# Altium footprint library PCB_V2.PcbLib: 82 footprints (part 5 of 6)
Each footprint in its own frame and in the unit in brackets; x right, y up, seen from the top. Pads: shape width x height; smd on the part's side, far side on the other; paste and mask are expansions set on the pad; w line width, h text height; cw(c..) or ccw(c..) is an arc to the next point about the centre after c.
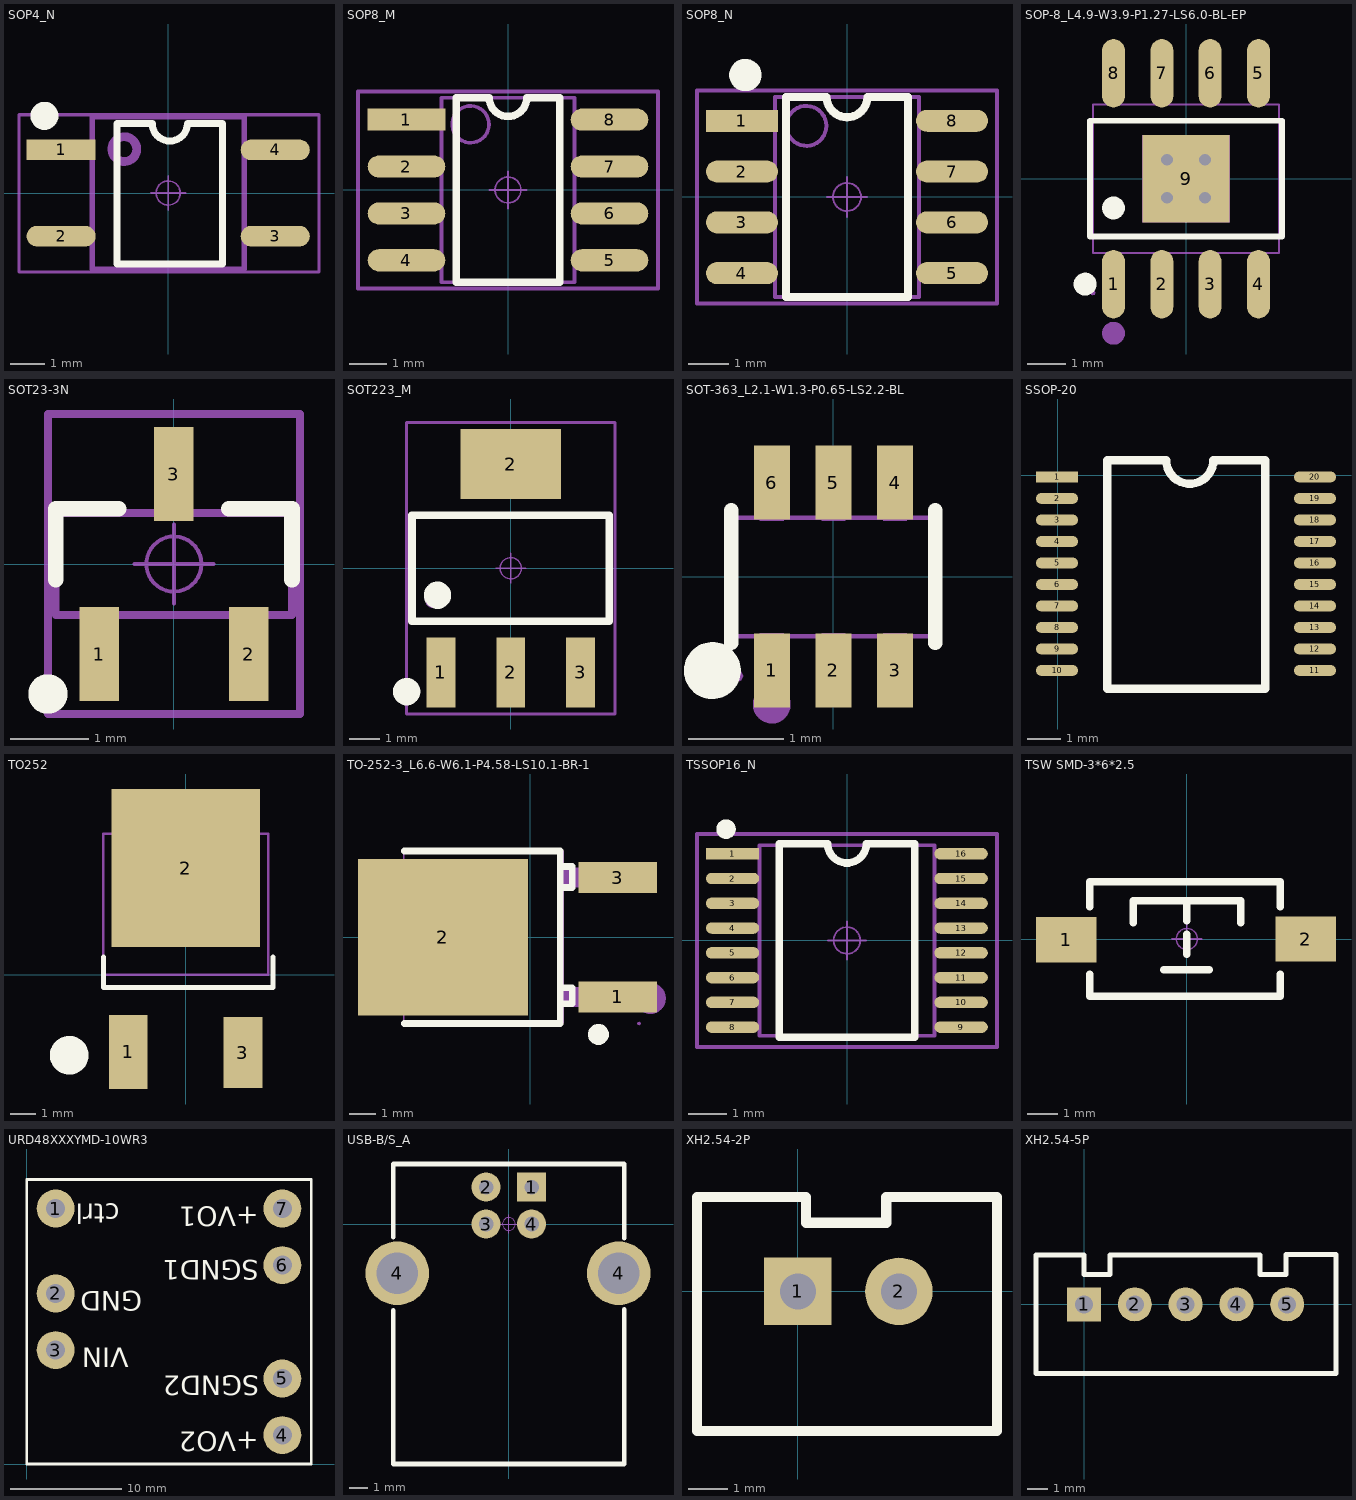
[diagram p4: the footprints below, top view; thin cyan lines are the x and y axes]

## SOP4_N [mm] "4.4*6.8*2.1"
pads (4):
  rect 2x0.6 smd: 1(-3.1,1.25)
  oval 2x0.6 smd: 2(-3.1,-1.25) 3(3.1,-1.25) 4(3.1,1.25)
Top Overlay:
  circle w0.5: c-3.581,2.235 r0.155
  lines w0.2: -1.476,2.012 -1.476,-2.052 1.572,-2.052 1.572,2.012
  lines w0.203: -1.476,2.012 -0.46,2.012 ccw(c0.048,2.012) 0.048,1.504 ccw(c0.048,2.012) 0.556,2.012 1.572,2.012
Mechanical 13:
  circle w0.254: c-1.27,1.27 r0.359
  lines w0.15: -2.2,-2.2 -2.2,2.2 2.2,2.2 2.2,-2.2 -2.2,-2.2
Mechanical 15:
  circle w0.05: c0,0 r0.35
  lines w0.05: -0.5,0 0.5,0 ; 0,-0.5 0,0.5
  lines w0.1: -4.318,-2.286 -4.318,2.266 4.366,2.266 4.366,-2.286 -4.318,-2.286
3D body: height 1.9, standoff 0, extent -3.403,-2.15 3.403,2.15

## SOP8_M [mm] "5*6*1.8mm（?"
height 1.75
pads (8):
  rect 2.1x0.6 smd: 1(-2.75,1.905)
  oval 2.1x0.6 smd: 2(-2.75,0.635) 3(-2.75,-0.635) 4(-2.75,-1.905) 5(2.75,-1.905) 6(2.75,-0.635) 7(2.75,0.635) 8(2.75,1.905)
Top Overlay:
  lines w0.2: -1.397,2.5 -1.397,-2.5 1.397,-2.5 1.397,2.5
  lines w0.203: -1.397,2.5 -0.508,2.5 ccw(c0,2.5) 0,1.992 ccw(c0,2.5) 0.508,2.5 1.397,2.5
Mechanical 13:
  circle w0.1: c-1.016,1.778 r0.5
  lines w0.1: -1.8,-2.5 -1.8,2.5 1.8,2.5 1.8,-2.5 -1.8,-2.5
Mechanical 15:
  circle w0.05: c0,0 r0.35
  lines w0.05: -0.5,0 0.5,0 ; 0,-0.5 0,0.5
  lines w0.1: -4.064,-2.667 -4.064,2.667 4.064,2.667 4.064,-2.667 -4.064,-2.667
3D body: height 1.9, standoff 0, extent -3.003,-2.5 3.003,2.5

## SOP8_N [mm] "5*6*1"
height 1.75
pads (8):
  rect 1.8x0.55 smd: 1(-2.625,1.905)
  oval 1.8x0.55 smd: 2(-2.625,0.635) 3(-2.625,-0.635) 4(-2.625,-1.905) 5(2.625,-1.905) 6(2.625,-0.635) 7(2.625,0.635) 8(2.625,1.905)
Top Overlay:
  circle w0.5: c-2.54,3.048 r0.155
  lines w0.2: -1.524,2.5 -1.524,-2.5 1.524,-2.5 1.524,2.5
  lines w0.203: -1.524,2.5 -0.508,2.5 ccw(c0,2.5) 0,1.992 ccw(c0,2.5) 0.508,2.5 1.524,2.5
Mechanical 13:
  circle w0.1: c-1.016,1.778 r0.5
  lines w0.1: -1.8,-2.5 1.8,-2.5 1.8,2.5 -1.8,2.5 -1.8,-2.5
Mechanical 15:
  circle w0.05: c0,0 r0.35
  lines w0.05: -0.5,0 0.5,0 ; 0,-0.5 0,0.5
  lines w0.1: -3.75,-2.667 -3.75,2.667 3.75,2.667 3.75,-2.667 -3.75,-2.667
3D body: height 1.9, standoff 0, extent -3.003,-2.5 3.003,2.5

## SOP-8_L4.9-W3.9-P1.27-LS6.0-BL-EP [mm]
pads (9):
  oval 0.6x1.8 smd: 1(-1.905,-2.772) 2(-0.635,-2.772) 3(0.635,-2.772) 4(1.905,-2.772) 5(1.905,2.772) 6(0.635,2.772) 7(-0.635,2.772) 8(-1.905,2.772)
  rect 2.29x2.29 smd: 9(0,0)
via 0.5,0.5 diameter 0.61 hole 0.305
via 0.5,-0.5 diameter 0.61 hole 0.305
via -0.5,-0.5 diameter 0.61 hole 0.305
via -0.5,0.5 diameter 0.61 hole 0.305
Top Overlay:
  circle w0.3: c-2.652,-2.772 r0.15
  circle w0.3: c-1.905,-0.769 r0.15
  lines w0.152: -2.526,-1.521 2.526,-1.521 2.526,1.521 -2.526,1.521 -2.526,-1.521
Mechanical 6:
  circle w0.3: c-1.905,-4.064 r0.15
Mechanical 15:
  region: -1.145,-1.145 -1.145,1.145 1.145,1.145 1.145,-1.145
  region: 1.695,2.175 1.695,1.94 2.115,1.94 2.115,2.175
  region: 1.695,3 1.695,2.165 2.115,2.165 2.115,3
  region: 0.425,2.175 0.425,1.94 0.845,1.94 0.845,2.175
  region: 0.425,3 0.425,2.165 0.845,2.165 0.845,3
  region: -0.845,2.175 -0.845,1.94 -0.425,1.94 -0.425,2.175
  region: -0.845,3 -0.845,2.165 -0.425,2.165 -0.425,3
  region: -2.115,2.175 -2.115,1.94 -1.695,1.94 -1.695,2.175
  region: -2.115,3 -2.115,2.165 -1.695,2.165 -1.695,3
  region: 1.695,-2.175 1.695,-1.94 2.115,-1.94 2.115,-2.175
  region: 1.695,-3 1.695,-2.165 2.115,-2.165 2.115,-3
  region: 0.425,-2.175 0.425,-1.94 0.845,-1.94 0.845,-2.175
  region: 0.425,-3 0.425,-2.165 0.845,-2.165 0.845,-3
  region: -0.845,-2.175 -0.845,-1.94 -0.425,-1.94 -0.425,-2.175
  region: -0.845,-3 -0.845,-2.165 -0.425,-2.165 -0.425,-3
  region: -2.115,-2.175 -2.115,-1.94 -1.695,-1.94 -1.695,-2.175
  region: -2.115,-3 -2.115,-2.165 -1.695,-2.165 -1.695,-3
  region: -2.386,-3 -2.404,-2.955 -2.45,-2.936 -2.496,-2.955 -2.514,-3 -2.496,-3.045 -2.45,-3.064 -2.404,-3.045
  lines w0.051: -2.45,-1.95 2.45,-1.95 2.45,1.95 -2.45,1.95 -2.45,-1.95

## SOT23-3N [mm] "3x1.3x1"
height 1.1
pads (3):
  rect 0.5x1.2 smd: 1(-0.95,-1.143) 2(0.95,-1.143) 3(0,1.143)
Top Overlay:
  circle w0.25: c-1.6,-1.651 r0.125
  lines w0.2: -1.501,-0.2 -1.501,0.7 -0.701,0.7 ; 0.699,0.7 1.499,0.7 1.499,-0.2
Mechanical 13:
  lines w0.1: -1.5,-0.65 -1.5,0.65 1.5,0.65 1.5,-0.65 -1.5,-0.65
Mechanical 15:
  circle w0.05: c0,0 r0.35
  lines w0.05: -0.5,0 0.5,0 ; 0,-0.5 0,0.5
  lines w0.1: -1.6,-1.905 -1.6,1.905 1.6,1.905 1.6,-1.905 -1.6,-1.905
3D body: height 1.05, standoff 0, extent -1.5,-1.2 1.5,1.2

## SOT223_M [mm] "6.4x7x1.6"
height 1.7
pads (4):
  rect 0.95x2.3 smd: 1(-2.3,-3.429) 2(0,-3.429) 3(2.3,-3.429)
  rect 3.3x2.3 smd: 2(0,3.429)
Top Overlay:
  circle w0.5: c-2.413,-0.889 r0.2
  circle w0.5: c-3.429,-4.064 r0.2
  lines w0.25: -3.25,-1.75 -3.25,1.75 3.25,1.75 3.25,-1.75 -3.25,-1.75
Mechanical 13:
  circle w0.1: c-2.536,-1.016 r0.25
  lines w0.1: -3.25,-1.75 3.25,-1.75 3.25,1.75 -3.25,1.75 -3.25,-1.75
Mechanical 15:
  circle w0.05: c0,0 r0.35
  lines w0.05: -0.5,0 0.5,0 ; 0,-0.5 0,0.5
  lines w0.1: -3.429,-4.8 3.429,-4.8 3.429,4.8 -3.429,4.8 -3.429,-4.8
3D body: height 1.65, standoff -0.02, extent -3.25,-3.508 3.25,3.508

## SOT-363_L2.1-W1.3-P0.65-LS2.2-BL [mm]
pads (6):
  rect 0.38x0.78 smd: 1(-0.65,-0.99) 2(0,-0.99) 3(0.65,-0.99) 4(0.65,0.99) 5(0,0.99) 6(-0.65,0.99)
Top Overlay:
  circle w0.3: c-1.277,-0.992 r0.15
  lines w0.152: -1.076,-0.701 -1.076,0.701 ; 1.076,-0.701 1.076,0.701
Mechanical 6:
  circle w0.2: c-0.65,-1.35 r0.1
Mechanical 15:
  region: -0.952,-1.05 -0.97,-1.005 -1.016,-0.986 -1.062,-1.005 -1.08,-1.05 -1.062,-1.095 -1.016,-1.114 -0.97,-1.095
  region: -0.775,-0.756 -0.775,-0.596 -0.525,-0.596 -0.525,-0.756
  region: -0.775,-1.106 -0.775,-0.746 -0.525,-0.746 -0.525,-1.106
  region: -0.125,-0.756 -0.125,-0.596 0.125,-0.596 0.125,-0.756
  region: -0.125,-1.106 -0.125,-0.746 0.125,-0.746 0.125,-1.106
  region: 0.525,-0.756 0.525,-0.596 0.775,-0.596 0.775,-0.756
  region: 0.525,-1.106 0.525,-0.746 0.775,-0.746 0.775,-1.106
  region: 0.525,0.59 0.525,0.75 0.775,0.75 0.775,0.59
  region: 0.525,0.74 0.525,1.1 0.775,1.1 0.775,0.74
  region: -0.125,0.59 -0.125,0.75 0.125,0.75 0.125,0.59
  region: -0.125,0.74 -0.125,1.1 0.125,1.1 0.125,0.74
  region: -0.775,0.59 -0.775,0.75 -0.525,0.75 -0.525,0.59
  region: -0.775,0.74 -0.775,1.1 -0.525,1.1 -0.525,0.74
  lines w0.051: -1.053,-0.63 -1.053,0.62 1.047,0.62 1.047,-0.63 -1.053,-0.63

## SSOP-20 [mm]
pads (20):
  rect 1.27x0.33 smd: 1(-0.025,-0.051)
  oval 1.27x0.33 smd: 2(-0.025,-0.701) 3(-0.025,-1.351) 4(-0.025,-2.001) 5(-0.025,-2.651) 6(-0.025,-3.301) 7(-0.025,-3.951) 8(-0.025,-4.601) 9(-0.025,-5.251) 10(-0.025,-5.901) 11(7.775,-5.901) 12(7.775,-5.251) 13(7.775,-4.601) 14(7.775,-3.951) 15(7.775,-3.301) 16(7.775,-2.651) 17(7.775,-2.001) 18(7.775,-1.351) 19(7.775,-0.701) 20(7.775,-0.051)
Top Overlay:
  lines w0.254: 6.223,-6.45 1.499,-6.45 1.499,0.449 3.269,0.449 3.277,0.457 ccw(c3.99,0.457) 4.703,0.457 6.266,0.457 6.274,0.449 6.274,-6.45

## TO252 [mil]
pads (3):
  rect 60x115 smd: 1(-89.55,-119.77)
  rect 230x245 smd: 2(0,165.35)
  rect 60x110 smd: 3(88.45,-120.77)
Top Overlay:
  circle w30: c-180.86,-125 r15
  lines w7.87: -127.95,27.56 -127.95,-20 135,-20 135,27.56
Mechanical 15:
  lines w3.94: -105.04,218.5 -105.04,236.06 -65.59,271.65 65.59,271.65 105.04,236.06 105.04,218.5 ; -127.95,0 127.95,0 127.95,218.5 -127.95,218.5 -127.95,0
3D body: height 90.55, standoff -0.2, extent -126.95,-120.28 128.95,250.56

## TO-252-3_L6.6-W6.1-P4.58-LS10.1-BR-1 [mm]
pads (3):
  rect 3x1.2 smd: 1(3.343,-2.285) 3(3.343,2.285)
  rect 6.5x6 smd: 2(-3.343,0)
Top Overlay:
  lines w0.254: -4.826,-3.302 1.143,-3.302 1.143,3.302 -4.826,3.302 ; 1.143,-2.54 1.611,-2.54 1.611,-1.936 1.143,-1.936 ; 1.143,1.905 1.611,1.905 1.611,2.706 1.143,2.706
  lines w0.4: 2.607,-3.52 ccw(c2.608,-3.72) 2.608,-3.92 ccw(c2.608,-3.72) 2.609,-3.52
Mechanical 6:
  circle w0.6: c4.588,-2.34 r0.3
Mechanical 15:
  region: 2.868,1.905 2.868,2.665 4.168,2.665 4.168,1.905
  region: 1.258,1.905 1.258,2.665 2.878,2.665 2.878,1.905
  region: 2.868,-2.665 2.868,-1.905 4.168,-1.905 4.168,-2.665
  region: 1.258,-2.665 1.258,-1.905 2.878,-1.905 2.878,-2.665
  region: -5.932,-2.645 -5.932,2.645 -0.432,2.645 -0.432,-2.645
  region: 4.233,-3.3 4.214,-3.254 4.168,-3.235 4.122,-3.254 4.103,-3.3 4.122,-3.346 4.168,-3.365 4.214,-3.346 4.233,-3.3
  lines w0.051: -4.833,-3.3 1.268,-3.3 1.268,3.3 -4.833,3.3 -4.833,-3.3

## TSSOP16_N [mm] "5*6.4*1mm（长宽"
pads (16):
  rect 1.4x0.3 smd: 1(-3.004,2.275)
  oval 1.4x0.3 smd: 2(-3.004,1.625) 3(-3.004,0.975) 4(-3.004,0.325) 5(-3.004,-0.325) 6(-3.004,-0.975) 7(-3.004,-1.625) 8(-3.004,-2.275) 9(2.996,-2.275) 10(2.996,-1.625) 11(2.996,-0.975) 12(2.996,-0.325) 13(2.996,0.325) 14(2.996,0.975) 15(2.996,1.625) 16(2.996,2.275)
Top Overlay:
  circle w0.254: c-3.175,2.921 r0.13
  lines w0.2: -1.778,-2.54 1.778,-2.54 1.778,2.54 0.508,2.54 cw(c0,2.54) -0.508,2.54 -1.778,2.54 -1.778,-2.54
Mechanical 13:
  lines w0.1: -2.3,-2.5 2.3,-2.5 2.3,2.5 -2.3,2.5 -2.3,-2.5
Mechanical 15:
  circle w0.05: c0,0 r0.35
  lines w0.05: -0.5,0 0.5,0 ; 0,-0.5 0,0.5
  lines w0.1: -3.937,-2.794 -3.937,2.794 3.937,2.794 3.937,-2.794 -3.937,-2.794
3D body: height 1.03, standoff -0.02, extent -3.202,-2.5 3.202,2.5

## TSW SMD-3*6*2.5 [mm]
pads (2):
  rect 2x1.5 smd: 1(-3.996,-0.02) 2(3.937,0)
Top Overlay:
  lines w0.254: -3.212,-1.168 -3.212,-1.9 3.088,-1.9 3.088,-1.168 ; -3.212,1.067 -3.212,1.9 3.088,1.9 3.088,1.067 ; -1.778,0.533 -1.778,1.27 1.778,1.27 1.778,0.533 ; -0.762,-1.016 0.737,-1.016 ; 0,-0.508 0,0.152 ; 0,0.61 0,1.27
Mechanical 15:
  circle w0.05: c0,0 r0.35
  lines w0.05: -0.5,0 0.5,0 ; 0,-0.5 0,0.5
3D body: height 2.59, standoff -0.03, extent -4,-1.877 4,1.623

## URD48XXXYMD-10WR3 [mm]
height 11.7
pads (7):
  round 3.4 hole 1.7: 1(2.59,22.91) 2(2.59,15.29) 3(2.59,10.21) 4(22.91,2.59) 5(22.91,7.67) 6(22.91,17.83) 7(22.91,22.91)
Top Overlay:
  lines w0.254: 0,0 0,25.5 25.5,25.5 25.5,0 0,0
  text "+VO1" at 20.777,23.673 h3
  text "SGND1" at 20.777,18.847 h3
  text "SGND2" at 20.828,8.509 h3
  text "+VO2" at 20.777,3.48 h3
  text "VIN" at 9.144,11.024 h3
  text "GND" at 10.363,16.078 h3
  text "ctrl" at 8.331,23.901 h3

## USB-B/S_A [mm] "b型USB 母座 16."
height 1.1
pads (6):
  rect 1.6x1.6 hole 0.8: 1(1.25,2.032)
  round 1.6 hole 0.8: 2(-1.25,2.032) 3(-1.25,0) 4(1.25,0)
  round 3.5 hole 2.3: 4(-6.141,-2.71) 4(6.051,-2.71)
Top Overlay:
  lines w0.254: -6.35,-4.737 -6.35,-13.208 6.35,-13.208 6.35,-4.686 ; -6.35,-0.724 -6.35,3.302 6.35,3.302 6.35,-0.775
Mechanical 15:
  circle w0.05: c0,0 r0.35
  lines w0.05: -0.5,0 0.5,0 ; 0,-0.5 0,0.5
3D body: height 11.45, standoff -2.95, extent -6.86,-13.16 6.859,3.14

## XH2.54-2P [mm] "?"
pads (2):
  rect 1.7x1.7 hole 0.9: 1(0,0)
  round 1.7 hole 0.9: 2(2.54,0)
Top Overlay:
  lines w0.254: -2.537,-3.505 5.006,-3.505 5.006,2.37 4.224,2.37 2.223,2.37 2.223,1.727 0.203,1.727 0.203,2.37 -2.537,2.37 -2.537,-3.505
3D body: height 7.05, standoff -2.45, extent -2.5,-3.3 5.04,2.4

## XH2.54-5P [mm] "?"
pads (5):
  rect 1.7x1.7 hole 0.9: 1(0,0)
  round 1.7 hole 0.9: 2(2.54,0) 3(5.08,0) 4(7.62,0) 5(10.16,0)
Top Overlay:
  lines w0.254: 1.3,2.438 1.3,1.5 0,1.5 0,2.464 -2.4,2.464 -2.4,-3.454 12.6,-3.454 12.6,2.489 10.1,2.489 10.1,1.5 8.8,1.5 8.8,2.464 1.3,2.464
3D body: height 7.03, standoff -2.47, extent -2.5,-3.3 12.66,2.4